# Altium footprint library Diode.PcbLib: 66 footprints (part 4 of 5)
Each footprint in its own frame and in the unit in brackets; x right, y up, seen from the top. Pads: shape width x height; smd on the part's side, far side on the other; paste and mask are expansions set on the pad; w line width, h text height; cw(c..) or ccw(c..) is an arc to the next point about the centre after c.
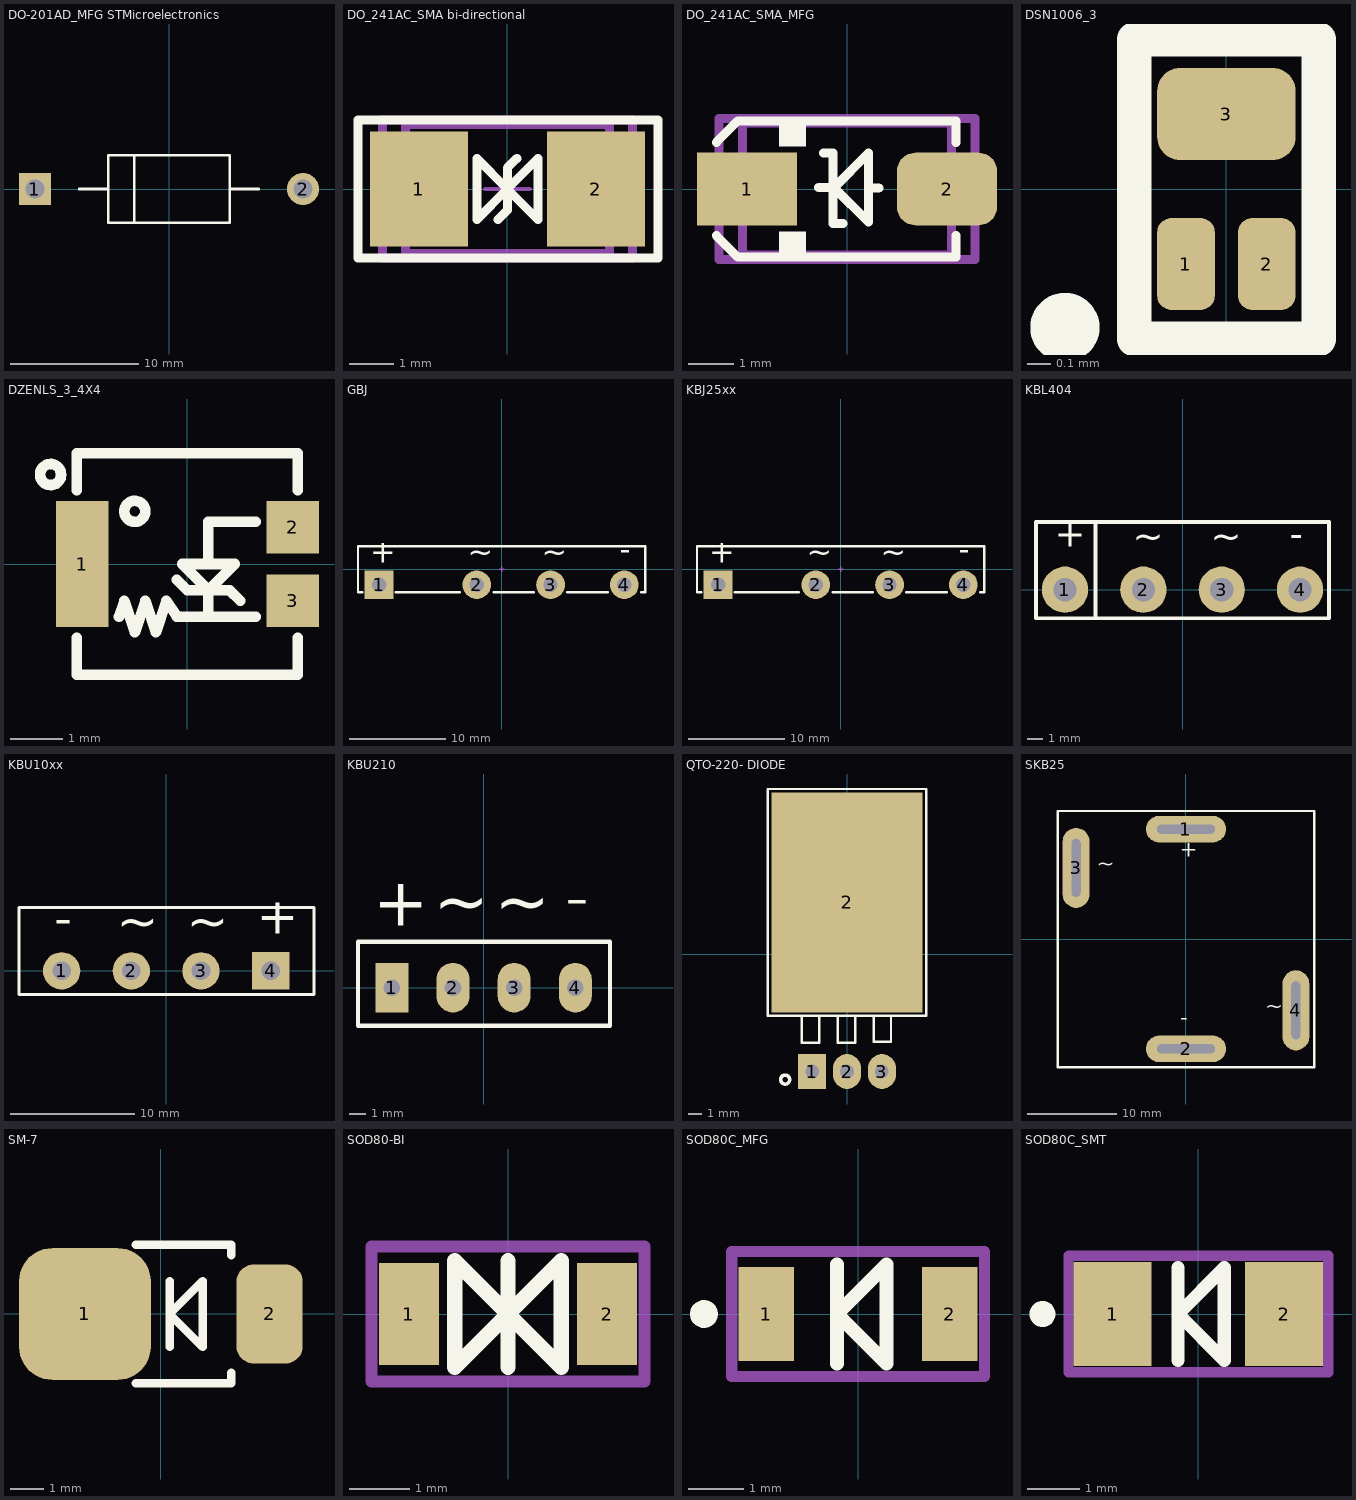
[diagram p3: the footprints below, top view; thin cyan lines are the x and y axes]

## DO-201AD_MFG STMicroelectronics [mm]
pads (2):
  rect 2.5x2.5 hole 1.45 paste-2539.97 mask+0: 1(-10.47,0)
  round 2.5 hole 1.45 paste-2539.97 mask+0: 2(10.47,0)
Top Overlay:
  lines w0.2: -7,0 -4.75,0 ; -2.7,-2.5 -2.7,2.5 ; 4.75,0 7,0 ; -4.75,-2.65 -4.75,2.65 4.75,2.65 4.75,-2.65 -4.75,-2.65
Top Designator:
  text ".Designator" at -3.71,-0.344 h1.52
3D body "Diode_STMicroelectronics_1N5822_eec.STEP": height 5.3, standoff -4, extent -11.114,-2.647 11.114,2.647

## DO_241AC_SMA bi-directional [mm]
pads (2):
  rect 2.2x2.6 smd: 1(-1.994,0) 2(1.994,0)
Top Overlay:
  lines w0.2: -0.214,-0.689 0,-0.475 0,0 ; 0.214,0.689 0,0.475 0,0 ; 0,0 0.689,0.689 0.689,-0.689 0,0 ; 0,0 -0.689,-0.689 -0.689,0.689 0,0 ; -3.366,-1.55 -3.366,1.55 3.391,1.55 3.391,-1.55 -3.366,-1.55
Top Designator:
  text ".Designator" at -3.698,-0.344 h1.52
Mechanical 10:
  lines w0.2: -2.815,-1.55 -2.815,1.55 2.815,1.55 2.815,-1.55 -2.815,-1.55
Mechanical 12:
  lines w0.2: -2.3,-1.45 -2.3,1.45 2.3,1.45 2.3,-1.45 -2.3,-1.45
Mechanical 15:
  lines w0.1: -0.5,0 0.5,0 ; 0,-0.5 0,0.5
  lines w0.2: -2.815,-1.55 -2.815,1.55 2.815,1.55 2.815,-1.55 -2.815,-1.55
3D body "Diode_STMicroelectronics_SMAJ5.0A-TR_eec.STEP": height 2.65, standoff 0, extent -2.538,-1.288 2.538,1.288

## DO_241AC_SMA_MFG [mm]
pads (2):
  rect 2.2x1.6 smd: 1(-2.2,0)
  rrect50% 2.2x1.6 smd: 2(2.2,0)
Top Overlay:
  region: -0.9,-0.94 -1.5,-0.94 -1.5,-1.5 -0.9,-1.5
  region: -0.9,1.5 -1.5,1.5 -1.5,0.94 -0.9,0.94
  lines w0.065: -0.273,0.032 -0.286,0.032 -0.26,0.032
  lines w0.2: -2.875,-1.025 -2.4,-1.5 2.4,-1.5 2.4,-1.025 ; -2.875,1.025 -2.4,1.5 2.4,1.5 2.4,1.025 ; -0.622,0.032 -0.273,0.032 ; -0.521,0.794 -0.311,0.794 -0.311,-0.756 -0.089,-0.756 ; 0.502,0.019 0.699,0.019 ; -0.286,0.032 0.476,0.794 0.476,-0.73 -0.286,0.032
Top Designator:
  text ".Designator" at -3.71,-0.344 h1.52
Mechanical 10:
  lines w0.2: -2.815,-1.55 2.815,-1.55 2.815,1.55 -2.815,1.55 -2.815,-1.55
Mechanical 12:
  lines w0.2: -2.3,-1.45 2.3,-1.45 2.3,1.45 -2.3,1.45 -2.3,-1.45
Mechanical 15:
  lines w0.2: -2.815,-1.55 2.815,-1.55 2.815,1.55 -2.815,1.55 -2.815,-1.55
3D body "Diode_STMicroelectronics_SMAJ5.0A-TR_eec.STEP": height 2.65, standoff 0, extent -2.538,-1.288 2.538,1.288

## DSN1006_3 [mm] "X2-DSN1006-3, 1X0.6X0.35mm"
height 0.35
pads (3):
  rrect50% 0.25x0.4 smd mask+0.05: 1(-0.175,-0.325) 2(0.175,-0.325)
  rrect50% 0.6x0.4 smd mask+0.05: 3(0,0.325)
Top Overlay:
  circle w0.2: c-0.7,-0.6 r0.05
  lines w0.15: -0.4,-0.65 -0.4,0.65 0.4,0.65 0.4,-0.65 -0.4,-0.65
Top Designator:
  text ".Designator" at -3.898,-0.356 h1.52
3D body "X1-DFN1006-3.stp": height 0.5, standoff 0, extent -0.3,-0.5 0.3,0.5

## DZENLS_3_4X4 [mm]
pads (3):
  rect 1x2.4 smd mask+0.1: 1(-2,0)
  rect 1x1 smd mask+0.1: 2(2,0.7) 3(2,-0.7)
Top Overlay:
  circle w0.2: c-2.6,1.7 r0.2
  circle w0.2: c-1,1 r0.2
  lines w0.2: -2.1,-1.4 -2.1,-2.1 2.1,-2.1 2.1,-1.4 ; -2.1,1.4 -2.1,2.1 2.1,2.1 2.1,1.4 ; -1.3,-1 -1.2,-0.7 -1,-1.3 -0.8,-0.7 -0.6,-1.3 -0.4,-0.7 -0.2,-1 0.4,-1 ; -0.2,-0.3 0,-0.5 0.8,-0.5 1,-0.7 ; 0.4,0 0.4,0.8 1.3,0.8 ; 1.3,-1 0.4,-1 ; 0.4,-1 0.4,-0.5 ; 0.4,-0.5 -0.1,0 0.9,0 0.4,-0.5 ; 0.5,-0.5 0.5,-0.5
Top Designator:
  text ".Designator" at -3.86,-0.344 h1.52
3D body: height 2, standoff 0, extent -2,-2 2,2

## GBJ [mm]
pads (4):
  rect 3x3 hole 1.5 mask+0.102: 1(-12.8,-1.6)
  round 3 hole 1.5 mask+0.102: 2(-2.6,-1.6) 3(5.1,-1.6) 4(12.8,-1.6)
Top Overlay:
  lines w0.254: -14.55,-2.4 -15,-2.4 -15,2.4 15,2.4 15,-2.4 14.55,-2.4 ; -11.05,-2.4 -4.35,-2.4 ; -0.85,-2.4 3.35,-2.4 ; 6.85,-2.4 11.05,-2.4
  text "+" at -13.696,-0.103 h4
  text "~" at 4.172,-0.099 h4
  text "~" at -3.528,-0.099 h4
  text "-" at 12.317,0.228 h4
Top Designator:
  text ".Designator" at -3.71,-0.681 h1.52
Mechanical 15:
  lines w0.15: -0.254,0 0.254,0 ; 0,-0.254 0,0.254
3D body: height 21.71, standoff 2.01, extent -15,-1.525 15,2.475
3D body: height 7.01, standoff 2.01, extent -15,-2.475 15,1.817
3D body: height 4.4, standoff -3, extent -13.35,-2.15 -12.25,-1.05
3D body: height 4.4, standoff -3, extent -3.15,-2.15 -2.05,-1.05
3D body: height 4.4, standoff -3, extent 4.55,-2.15 5.65,-1.05
3D body: height 4.4, standoff -3, extent 12.25,-2.15 13.35,-1.05

## KBJ25xx [mm] "30*4.8*19.7mm"
pads (4):
  rect 3x3 hole 1.5 mask+0.102: 1(-12.8,-1.6)
  round 3 hole 1.5 mask+0.102: 2(-2.6,-1.6) 3(5.1,-1.6) 4(12.8,-1.6)
Top Overlay:
  lines w0.254: -14.55,-2.4 -15,-2.4 -15,2.4 15,2.4 15,-2.4 14.55,-2.4 ; -11.05,-2.4 -4.35,-2.4 ; -0.85,-2.4 3.35,-2.4 ; 6.85,-2.4 11.05,-2.4
  text "-" at 12.317,0.228 h4
  text "~" at -3.528,-0.099 h4
  text "~" at 4.172,-0.099 h4
  text "+" at -13.696,-0.103 h4
Top Designator:
  text ".Designator" at -3.71,-0.681 h1.52
Mechanical 15:
  lines w0.15: -0.254,0 0.254,0 ; 0,-0.254 0,0.254
3D body: height 4.4, standoff -3, extent 12.25,-2.15 13.35,-1.05
3D body: height 4.4, standoff -3, extent 4.55,-2.15 5.65,-1.05
3D body: height 4.4, standoff -3, extent -3.15,-2.15 -2.05,-1.05
3D body: height 4.4, standoff -3, extent -13.35,-2.15 -12.25,-1.05
3D body: height 7.01, standoff 2.01, extent -15,-2.475 15,1.817
3D body: height 21.71, standoff 2.01, extent -15,-1.525 15,2.475

## KBL404 [mm]
pads (4):
  round 3 hole 1.5: 1(-7.62,0) 2(-2.54,0) 3(2.54,0) 4(7.62,0)
Top Overlay:
  lines w0.254: -5.639,-1.829 -5.639,4.394 ; -9.5,-1.854 9.5,-1.854 9.5,4.394 -9.5,4.394 -9.5,-1.854
  text "+" at -8.292,2.184 h3
  text "-" at 6.948,2.184 h3
  text "~" at 1.845,2.032 h3
  text "~" at -3.235,2.032 h3
Top Designator:
  text ".Designator" at -3.71,0.926 h1.52
3D body "KBL410.sldprt": height 16.7, standoff -2, extent -9.5,-1.85 9.5,4.4

## KBU10xx [mm] "22.7x19.8x6.6mm"
pads (4):
  round 3 hole 1.5 mask+0.102: 1(-8.4,0) 2(-2.8,0) 3(2.8,0)
  rect 3x3 hole 1.5 mask+0.102: 4(8.4,0)
Top Overlay:
  lines w0.254: -11.825,-1.9 11.875,-1.9 11.875,5.1 -11.825,5.1 -11.825,-1.9
  text "+" at 7.28,2.014 h5
  text "~" at 1.641,1.613 h5
  text "~" at -3.959,1.613 h5
  text "-" at -9.004,1.944 h5
Top Designator:
  text ".Designator" at -3.685,1.256 h1.52
3D body "KBU1010.step": height 33.9, standoff -16.9, extent -11.82,-1.912 11.88,5.088

## KBU210 [mm] "4-SIP, KBPR"
pads (4):
  rect 2x3 hole 1 mask+0.102: 1(-5.55,0)
  oval 2x3 hole 1 mask+0.102: 2(-1.85,0) 3(1.85,0) 4(5.55,0)
Top Overlay:
  lines w0.254: -7.595,-2.31 -7.595,2.77 7.645,2.77 7.645,-2.31 -7.595,-2.31
  text "~" at -3.009,2.863 h5
  text "~" at 0.691,2.863 h5
  text "+" at -6.67,2.764 h5
  text "-" at 4.946,3.194 h5
Top Designator:
  text ".Designator" at -3.685,1.256 h1.52
3D body "KBP.STEP": height 12.7, standoff -2.6, extent -7.595,-2.31 7.645,2.77

## QTO-220- DIODE [mil] "TO-220 - 1-2-3"
height 200
pads (4):
  rect 80x100 hole 39: 1(-100,-336.5)
  oval 80x100 hole 39: 2(0,-336.5) 3(100,-336.5)
  rect 433.07x629.92 smd: 2(0,147.64)
Top Overlay:
  circle w10: c-177.03,-359.5 r12.97
  lines w7: -129,-177.17 -129,-253.5 -79,-253.5 -79,-177.17 ; -26,-177.17 -26,-253.5 24,-253.5 24,-177.17 ; 76,-177.17 76,-251.5 126,-251.5 126,-179.17 125,-178.17 ; -226.38,-177.17 226.38,-177.17 226.38,472.44 -226.38,472.44 -226.38,207.81 -226.38,-177.17
3D body "SW3DPS-TO-220-DEFAULT.STEP": height 165.35, standoff -118.11, extent -200,-340.16 200,427.16

## SKB25 [mm]
pads (4):
  oval 9x3 hole 1 slot 6.5 at 0 deg: 1(0,12.35) 2(0,-12.329)
  oval 3x9 hole 1 slot 6.5 at 90 deg: 3(-12.35,8) 4(12.35,-8)
Top Overlay:
  lines w0.254: -14.402,-14.402 -14.402,14.402 14.402,14.402 14.402,-14.402 -14.402,-14.402
  text "~" at -10.043,7.039 h3
  text "~" at 8.906,-8.961 h3
  text "-" at -0.672,-10.262 h3
  text "+" at -0.695,8.611 h3
Top Designator:
  text ".Designator" at -3.71,-0.344 h1.52
3D body "User Library-SKB 25.STEP": height 14, standoff -8.56, extent -14.398,-14.4 14.402,14.4

## SM-7 [mm]
pads (2):
  rrect50% 4x4 smd: 1(-2.3,0)
  rrect50% 2x3 smd: 2(3.302,0)
Top Overlay:
  lines w0.254: -0.762,-2.1 2.138,-2.1 2.138,-1.778 ; -0.762,2.1 2.138,2.1 2.138,1.778 ; 0.27,-1 0.27,1 ; 0.27,0 1.27,-1 1.27,1 0.27,0
Top Designator:
  text ".Designator" at -3.709,-0.344 h1.52
3D body "User Library-SM7.sldprt": height 1.4, standoff 0, extent -3.8,-2.3 3.8,2.3

## SOD80-BI [mm] "Bi-directional, DB3"
pads (2):
  rect 1x1.7 smd: 1(-1.65,0) 2(1.65,0)
Top Overlay:
  lines w0.254: 0,-0.889 0,0.889 ; 0,0 0.889,-0.889 0.889,0.889 0,0 ; 0,0 -0.889,-0.889 -0.889,0.889 0,0
Top Designator:
  text ".Designator" at -3.71,-0.344 h1.52
Bottom Designator:
  lines w0.2: -2.275,-1.125 2.275,-1.125 2.275,1.125 -2.275,1.125 -2.275,-1.125
Mechanical 15:
  lines w0.2: -2.275,-1.125 2.275,-1.125 2.275,1.125 -2.275,1.125 -2.275,-1.125
3D body "Diode_Nexperia_BZV55-C5V1_115_eec.STEP": height 1.6, standoff 0, extent -1.75,-0.8 1.75,0.8

## SOD80C_MFG [mm]
pads (2):
  rect 1x1.7 smd: 1(-1.65,0) 2(1.65,0)
Top Overlay:
  circle w0.25: c-2.775,0 r0.125
  lines w0.254: -0.381,-0.889 -0.381,0.889 ; -0.381,0 0.508,-0.889 0.508,0.889 -0.381,0
Top Designator:
  text ".Designator" at -4.035,-0.344 h1.52
Bottom Designator:
  lines w0.2: -2.275,-1.125 2.275,-1.125 2.275,1.125 -2.275,1.125 -2.275,-1.125
Mechanical 15:
  lines w0.2: -2.275,-1.125 2.275,-1.125 2.275,1.125 -2.275,1.125 -2.275,-1.125
3D body "Diode_Nexperia_BZV55-C5V1_115_eec.STEP": height 1.6, standoff 0, extent -1.75,-0.8 1.75,0.8

## SOD80C_SMT [mm]
pads (2):
  rect 1.5x2 smd: 1(-1.65,0) 2(1.65,0)
Top Overlay:
  circle w0.25: c-3,0 r0.125
  lines w0.254: -0.389,-0.889 -0.389,0.889 ; -0.389,0 0.5,-0.889 0.5,0.889 -0.389,0
Top Designator:
  text ".Designator" at -4.035,-0.344 h1.52
Mechanical 15:
  lines w0.2: -2.5,-1.125 2.5,-1.125 2.5,1.125 -2.5,1.125 -2.5,-1.125
3D body "Diode_Nexperia_BZV55-C5V1_115_eec.STEP": height 1.6, standoff 0, extent -1.75,-0.8 1.75,0.8